# Altium footprint library Terminal_Blocks_Pluggable PCB_5.08mm.PcbLib: 299 footprints (part 4 of 19)
Each footprint in its own frame and in the unit in brackets; x right, y up, seen from the top. Pads: shape width x height; smd on the part's side, far side on the other; paste and mask are expansions set on the pad; w line width, h text height; cw(c..) or ccw(c..) is an arc to the next point about the centre after c.
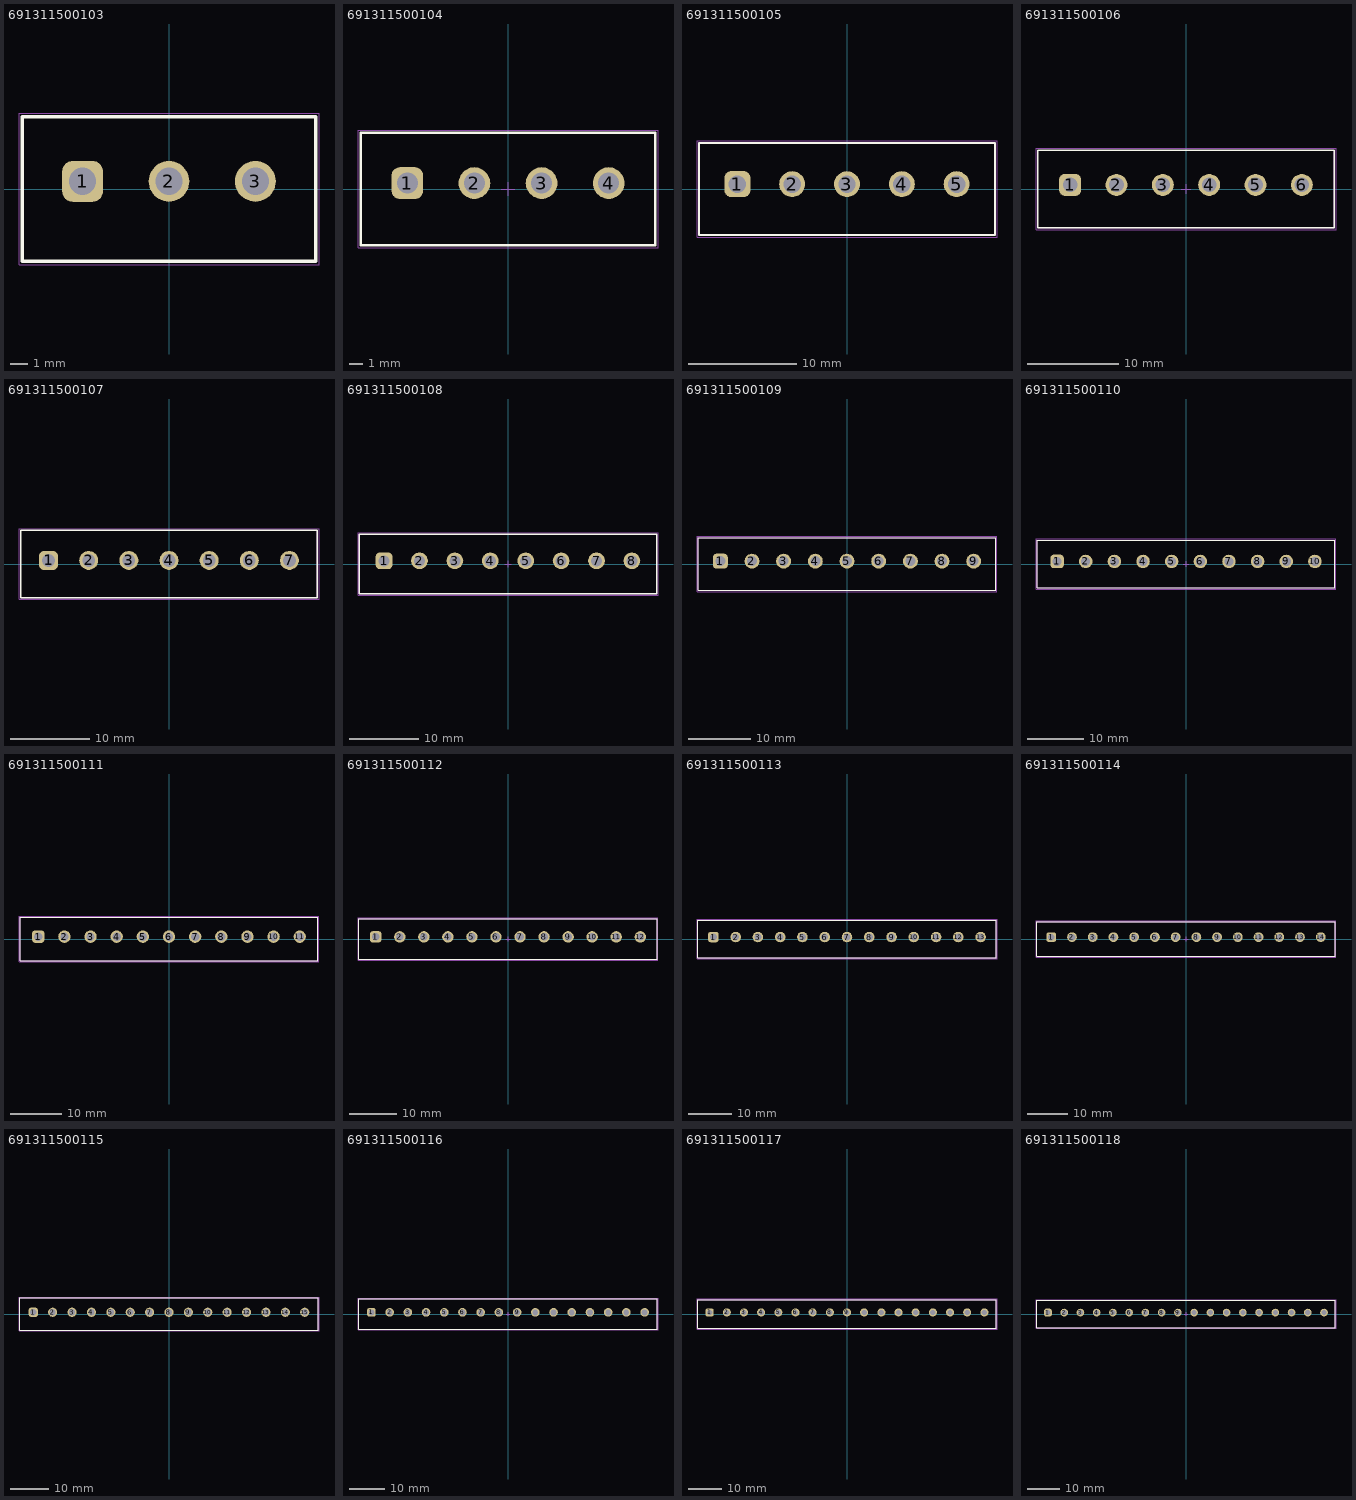
[diagram p3: the footprints below, top view; thin cyan lines are the x and y axes]

## 691311500103 [mm] "5,08mm - PCB Headers - Vertical - Closed ends -03p"
height 12
pads (3):
  rrect50% 2.4x2.4 hole 1.6: 1(-5.08,0.45)
  round 2.4 hole 1.6: 2(0,0.45) 3(5.08,0.45)
Top Overlay:
  lines w0.2: -8.62,-4.25 8.62,-4.25 8.62,4.25 -8.62,4.25 -8.62,-4.25
Top Designator:
  text ".Designator" at -7.498,-0.5 h1.5
Top Component Outline:
  lines w0.1: -8.62,-4.25 -8.62,4.25 8.62,4.25 8.62,-4.25 -8.62,-4.25
Top 3D Body:
  lines w0.1: -8.62,-4.25 8.62,-4.25 8.62,4.25 -8.62,4.25 -8.62,-4.25
Top Courtyard:
  lines w0.05: -8.82,-4.45 8.82,-4.45 8.82,4.45 -8.82,4.45 -8.82,-4.45
Top Component Center:
  lines w0.05: -0.5,0 0.5,0 ; 0,-0.5 0,0.5
3D body "691311500103.stp": height 12.05, standoff -3.95, extent -8.62,-4.25 8.62,4.25

## 691311500104 [mm] "5,08mm - PCB Headers - Vertical - Closed ends -04p"
height 12
pads (4):
  rrect50% 2.4x2.4 hole 1.6: 1(-7.62,0.45)
  round 2.4 hole 1.6: 2(-2.54,0.45) 3(2.54,0.45) 4(7.62,0.45)
Top Overlay:
  lines w0.2: -11.16,-4.25 -11.16,4.25 11.16,4.25 11.16,-4.25 -11.16,-4.25
Top Designator:
  text ".Designator" at -7.498,-0.5 h1.5
Top Component Outline:
  lines w0.1: -11.16,-4.25 11.16,-4.25 11.16,4.25 -11.16,4.25 -11.16,-4.25
Top 3D Body:
  lines w0.1: -11.16,-4.25 -11.16,4.25 11.16,4.25 11.16,-4.25 -11.16,-4.25
Top Courtyard:
  lines w0.05: -11.36,-4.45 -11.36,4.45 11.36,4.45 11.36,-4.45 -11.36,-4.45
Top Component Center:
  lines w0.05: -0.5,0 0.5,0 ; 0,-0.5 0,0.5
3D body "691311500104.stp": height 12.05, standoff -3.95, extent -11.16,-4.25 11.16,4.25

## 691311500105 [mm] "5,08mm - PCB Headers - Vertical - Closed ends -05p"
height 12
pads (5):
  rrect50% 2.4x2.4 hole 1.6: 1(-10.16,0.45)
  round 2.4 hole 1.6: 2(-5.08,0.45) 3(0,0.45) 4(5.08,0.45) 5(10.16,0.45)
Top Overlay:
  lines w0.2: -13.7,-4.25 -13.7,4.25 13.7,4.25 13.7,-4.25 -13.7,-4.25
Top Designator:
  text ".Designator" at -7.498,-0.5 h1.5
Top Component Outline:
  lines w0.1: -13.7,-4.25 13.7,-4.25 13.7,4.25 -13.7,4.25 -13.7,-4.25
Top 3D Body:
  lines w0.1: -13.7,-4.25 -13.7,4.25 13.7,4.25 13.7,-4.25 -13.7,-4.25
Top Courtyard:
  lines w0.05: -13.9,-4.45 -13.9,4.45 13.9,4.45 13.9,-4.45 -13.9,-4.45
Top Component Center:
  lines w0.05: -0.5,0 0.5,0 ; 0,-0.5 0,0.5
3D body "691311500105.stp": height 12.05, standoff -3.95, extent -13.7,-4.25 13.7,4.25

## 691311500106 [mm] "5,08mm - PCB Headers - Vertical - Closed ends -06p"
height 12
pads (6):
  rrect50% 2.4x2.4 hole 1.6: 1(-12.7,0.45)
  round 2.4 hole 1.6: 2(-7.62,0.45) 3(-2.54,0.45) 4(2.54,0.45) 5(7.62,0.45) 6(12.7,0.45)
Top Overlay:
  lines w0.2: -16.24,-4.25 16.24,-4.25 16.24,4.25 -16.24,4.25 -16.24,-4.25
Top Designator:
  text ".Designator" at -7.498,-0.5 h1.5
Top Component Outline:
  lines w0.1: -16.24,-4.25 -16.24,4.25 16.24,4.25 16.24,-4.25 -16.24,-4.25
Top 3D Body:
  lines w0.1: -16.24,-4.25 16.24,-4.25 16.24,4.25 -16.24,4.25 -16.24,-4.25
Top Courtyard:
  lines w0.05: -16.44,-4.45 16.44,-4.45 16.44,4.45 -16.44,4.45 -16.44,-4.45
Top Component Center:
  lines w0.05: -0.5,0 0.5,0 ; 0,-0.5 0,0.5
3D body "691311500106.stp": height 12.05, standoff -3.95, extent -16.24,-4.25 16.24,4.25

## 691311500107 [mm] "5,08mm - PCB Headers - Vertical - Closed ends -07p"
height 12
pads (7):
  rrect50% 2.4x2.4 hole 1.6: 1(-15.24,0.45)
  round 2.4 hole 1.6: 2(-10.16,0.45) 3(-5.08,0.45) 4(0,0.45) 5(5.08,0.45) 6(10.16,0.45) 7(15.24,0.45)
Top Overlay:
  lines w0.2: -18.78,-4.25 18.78,-4.25 18.78,4.25 -18.78,4.25 -18.78,-4.25
Top Designator:
  text ".Designator" at -7.498,-0.5 h1.5
Top Component Outline:
  lines w0.1: -18.78,-4.25 -18.78,4.25 18.78,4.25 18.78,-4.25 -18.78,-4.25
Top 3D Body:
  lines w0.1: -18.78,-4.25 18.78,-4.25 18.78,4.25 -18.78,4.25 -18.78,-4.25
Top Courtyard:
  lines w0.05: -18.98,-4.45 18.98,-4.45 18.98,4.45 -18.98,4.45 -18.98,-4.45
Top Component Center:
  lines w0.05: -0.5,0 0.5,0 ; 0,-0.5 0,0.5
3D body "691311500107.stp": height 12.05, standoff -3.95, extent -18.78,-4.25 18.78,4.25

## 691311500108 [mm] "5,08mm - PCB Headers - Vertical - Closed ends -08p"
height 12
pads (8):
  rrect50% 2.4x2.4 hole 1.6: 1(-17.78,0.45)
  round 2.4 hole 1.6: 2(-12.7,0.45) 3(-7.62,0.45) 4(-2.54,0.45) 5(2.54,0.45) 6(7.62,0.45) 7(12.7,0.45) 8(17.78,0.45)
Top Overlay:
  lines w0.2: -21.32,-4.25 21.32,-4.25 21.32,4.25 -21.32,4.25 -21.32,-4.25
Top Designator:
  text ".Designator" at -7.498,-0.5 h1.5
Top Component Outline:
  lines w0.1: -21.32,-4.25 -21.32,4.25 21.32,4.25 21.32,-4.25 -21.32,-4.25
Top 3D Body:
  lines w0.1: -21.32,-4.25 21.32,-4.25 21.32,4.25 -21.32,4.25 -21.32,-4.25
Top Courtyard:
  lines w0.05: -21.52,-4.45 21.52,-4.45 21.52,4.45 -21.52,4.45 -21.52,-4.45
Top Component Center:
  lines w0.05: -0.5,0 0.5,0 ; 0,-0.5 0,0.5
3D body "691311500108.stp": height 12.05, standoff -3.95, extent -21.32,-4.25 21.32,4.25

## 691311500109 [mm] "5,08mm - PCB Headers - Vertical - Closed ends -09p"
height 12
pads (9):
  rrect50% 2.4x2.4 hole 1.6: 1(-20.32,0.45)
  round 2.4 hole 1.6: 2(-15.24,0.45) 3(-10.16,0.45) 4(-5.08,0.45) 5(0,0.45) 6(5.08,0.45) 7(10.16,0.45) 8(15.24,0.45) 9(20.32,0.45)
Top Overlay:
  lines w0.2: -23.86,-4.25 23.86,-4.25 23.86,4.25 -23.86,4.25 -23.86,-4.25
Top Designator:
  text ".Designator" at -7.498,-0.5 h1.5
Top Component Outline:
  lines w0.1: -23.86,-4.25 -23.86,4.25 23.86,4.25 23.86,-4.25 -23.86,-4.25
Top 3D Body:
  lines w0.1: -23.86,-4.25 23.86,-4.25 23.86,4.25 -23.86,4.25 -23.86,-4.25
Top Courtyard:
  lines w0.05: -24.06,-4.45 24.06,-4.45 24.06,4.45 -24.06,4.45 -24.06,-4.45
Top Component Center:
  lines w0.05: -0.5,0 0.5,0 ; 0,-0.5 0,0.5
3D body "691311500109.stp": height 12.05, standoff -3.95, extent -23.86,-4.25 23.86,4.25

## 691311500110 [mm] "5,08mm - PCB Headers - Vertical - Closed ends -10p"
height 12
pads (10):
  rrect50% 2.4x2.4 hole 1.6: 1(-22.86,0.45)
  round 2.4 hole 1.6: 2(-17.78,0.45) 3(-12.7,0.45) 4(-7.62,0.45) 5(-2.54,0.45) 6(2.54,0.45) 7(7.62,0.45) 8(12.7,0.45) 9(17.78,0.45) 10(22.86,0.45)
Top Overlay:
  lines w0.2: -26.4,-4.25 26.4,-4.25 26.4,4.25 -26.4,4.25 -26.4,-4.25
Top Designator:
  text ".Designator" at -7.498,-0.5 h1.5
Top Component Outline:
  lines w0.1: -26.4,-4.25 -26.4,4.25 26.4,4.25 26.4,-4.25 -26.4,-4.25
Top 3D Body:
  lines w0.1: -26.4,-4.25 26.4,-4.25 26.4,4.25 -26.4,4.25 -26.4,-4.25
Top Courtyard:
  lines w0.05: -26.6,-4.45 26.6,-4.45 26.6,4.45 -26.6,4.45 -26.6,-4.45
Top Component Center:
  lines w0.05: -0.5,0 0.5,0 ; 0,-0.5 0,0.5
3D body "691311500110.stp": height 12.05, standoff -3.95, extent -26.4,-4.25 26.4,4.25

## 691311500111 [mm] "5,08mm - PCB Headers - Vertical - Closed ends -11p"
height 12
pads (11):
  rrect50% 2.4x2.4 hole 1.6: 1(-25.4,0.45)
  round 2.4 hole 1.6: 2(-20.32,0.45) 3(-15.24,0.45) 4(-10.16,0.45) 5(-5.08,0.45) 6(0,0.45) 7(5.08,0.45) 8(10.16,0.45) 9(15.24,0.45) 10(20.32,0.45) 11(25.4,0.45)
Top Overlay:
  lines w0.2: -28.94,-4.25 28.94,-4.25 28.94,4.25 -28.94,4.25 -28.94,-4.25
Top Designator:
  text ".Designator" at -7.498,-0.5 h1.5
Top Component Outline:
  lines w0.1: -28.94,-4.25 -28.94,4.25 28.94,4.25 28.94,-4.25 -28.94,-4.25
Top 3D Body:
  lines w0.1: -28.94,-4.25 28.94,-4.25 28.94,4.25 -28.94,4.25 -28.94,-4.25
Top Courtyard:
  lines w0.05: -29.14,-4.45 29.14,-4.45 29.14,4.45 -29.14,4.45 -29.14,-4.45
Top Component Center:
  lines w0.05: -0.5,0 0.5,0 ; 0,-0.5 0,0.5
3D body "691311500111.stp": height 12.05, standoff -3.95, extent -28.94,-4.25 28.94,4.25

## 691311500112 [mm] "5,08mm - PCB Headers - Vertical - Closed ends -12p"
height 12
pads (12):
  rrect50% 2.4x2.4 hole 1.6: 1(-27.94,0.45)
  round 2.4 hole 1.6: 2(-22.86,0.45) 3(-17.78,0.45) 4(-12.7,0.45) 5(-7.62,0.45) 6(-2.54,0.45) 7(2.54,0.45) 8(7.62,0.45) 9(12.7,0.45) 10(17.78,0.45) 11(22.86,0.45) 12(27.94,0.45)
Top Overlay:
  lines w0.2: -31.48,-4.25 -31.48,4.25 31.48,4.25 31.48,-4.25 -31.48,-4.25
Top Designator:
  text ".Designator" at -7.498,-0.5 h1.5
Top Component Outline:
  lines w0.1: -31.48,-4.25 31.48,-4.25 31.48,4.25 -31.48,4.25 -31.48,-4.25
Top 3D Body:
  lines w0.1: -31.48,-4.25 -31.48,4.25 31.48,4.25 31.48,-4.25 -31.48,-4.25
Top Courtyard:
  lines w0.05: -31.68,-4.45 -31.68,4.45 31.68,4.45 31.68,-4.45 -31.68,-4.45
Top Component Center:
  lines w0.05: -0.5,0 0.5,0 ; 0,-0.5 0,0.5
3D body "691311500112.stp": height 12.05, standoff -3.95, extent -31.48,-4.25 31.48,4.25

## 691311500113 [mm] "5,08mm - PCB Headers - Vertical - Closed ends -13p"
height 12
pads (13):
  rrect50% 2.4x2.4 hole 1.6: 1(-30.48,0.45)
  round 2.4 hole 1.6: 2(-25.4,0.45) 3(-20.32,0.45) 4(-15.24,0.45) 5(-10.16,0.45) 6(-5.08,0.45) 7(0,0.45) 8(5.08,0.45) 9(10.16,0.45) 10(15.24,0.45) 11(20.32,0.45) 12(25.4,0.45) 13(30.48,0.45)
Top Overlay:
  lines w0.2: -34.02,-4.25 34.02,-4.25 34.02,4.25 -34.02,4.25 -34.02,-4.25
Top Designator:
  text ".Designator" at -7.498,-0.5 h1.5
Top Component Outline:
  lines w0.1: -34.02,-4.25 -34.02,4.25 34.02,4.25 34.02,-4.25 -34.02,-4.25
Top 3D Body:
  lines w0.1: -34.02,-4.25 34.02,-4.25 34.02,4.25 -34.02,4.25 -34.02,-4.25
Top Courtyard:
  lines w0.05: -34.22,-4.45 34.22,-4.45 34.22,4.45 -34.22,4.45 -34.22,-4.45
Top Component Center:
  lines w0.05: -0.5,0 0.5,0 ; 0,-0.5 0,0.5
3D body "691311500113.stp": height 12.05, standoff -3.95, extent -34.02,-4.25 34.02,4.25

## 691311500114 [mm] "5,08mm - PCB Headers - Vertical - Closed ends -14p"
height 12
pads (14):
  rrect50% 2.4x2.4 hole 1.6: 1(-33.02,0.45)
  round 2.4 hole 1.6: 2(-27.94,0.45) 3(-22.86,0.45) 4(-17.78,0.45) 5(-12.7,0.45) 6(-7.62,0.45) 7(-2.54,0.45) 8(2.54,0.45) 9(7.62,0.45) 10(12.7,0.45) 11(17.78,0.45) 12(22.86,0.45) 13(27.94,0.45) 14(33.02,0.45)
Top Overlay:
  lines w0.2: -36.56,-4.25 -36.56,4.25 36.56,4.25 36.56,-4.25 -36.56,-4.25
Top Designator:
  text ".Designator" at -7.498,-0.5 h1.5
Top Component Outline:
  lines w0.1: -36.56,-4.25 36.56,-4.25 36.56,4.25 -36.56,4.25 -36.56,-4.25
Top 3D Body:
  lines w0.1: -36.56,-4.25 -36.56,4.25 36.56,4.25 36.56,-4.25 -36.56,-4.25
Top Courtyard:
  lines w0.05: -36.76,-4.45 -36.76,4.45 36.76,4.45 36.76,-4.45 -36.76,-4.45
Top Component Center:
  lines w0.05: -0.5,0 0.5,0 ; 0,-0.5 0,0.5
3D body "691311500114.stp": height 12.05, standoff -3.95, extent -36.56,-4.25 36.56,4.25

## 691311500115 [mm] "5,08mm - PCB Headers - Vertical - Closed ends -15p"
height 12
pads (15):
  rrect50% 2.4x2.4 hole 1.6: 1(-35.56,0.45)
  round 2.4 hole 1.6: 2(-30.48,0.45) 3(-25.4,0.45) 4(-20.32,0.45) 5(-15.24,0.45) 6(-10.16,0.45) 7(-5.08,0.45) 8(0,0.45) 9(5.08,0.45) 10(10.16,0.45) 11(15.24,0.45) 12(20.32,0.45) 13(25.4,0.45) 14(30.48,0.45) 15(35.56,0.45)
Top Overlay:
  lines w0.2: -39.1,-4.25 39.1,-4.25 39.1,4.25 -39.1,4.25 -39.1,-4.25
Top Designator:
  text ".Designator" at -7.498,-0.5 h1.5
Top Component Outline:
  lines w0.1: -39.1,-4.25 -39.1,4.25 39.1,4.25 39.1,-4.25 -39.1,-4.25
Top 3D Body:
  lines w0.1: -39.1,-4.25 39.1,-4.25 39.1,4.25 -39.1,4.25 -39.1,-4.25
Top Courtyard:
  lines w0.05: -39.3,-4.45 39.3,-4.45 39.3,4.45 -39.3,4.45 -39.3,-4.45
Top Component Center:
  lines w0.05: -0.5,0 0.5,0 ; 0,-0.5 0,0.5
3D body "691311500115.stp": height 12.05, standoff -3.95, extent -39.1,-4.25 39.1,4.25

## 691311500116 [mm] "5,08mm - PCB Headers - Vertical - Closed ends -16p"
height 12
pads (16):
  rrect50% 2.4x2.4 hole 1.6: 1(-38.1,0.45)
  round 2.4 hole 1.6: 2(-33.02,0.45) 3(-27.94,0.45) 4(-22.86,0.45) 5(-17.78,0.45) 6(-12.7,0.45) 7(-7.62,0.45) 8(-2.54,0.45) 9(2.54,0.45) 10(7.62,0.45) 11(12.7,0.45) 12(17.78,0.45) 13(22.86,0.45) 14(27.94,0.45) 15(33.02,0.45) 16(38.1,0.45)
Top Overlay:
  lines w0.2: -41.64,-4.25 41.64,-4.25 41.64,4.25 -41.64,4.25 -41.64,-4.25
Top Designator:
  text ".Designator" at -7.498,-0.5 h1.5
Top Component Outline:
  lines w0.1: -41.64,-4.25 -41.64,4.25 41.64,4.25 41.64,-4.25 -41.64,-4.25
Top 3D Body:
  lines w0.1: -41.64,-4.25 41.64,-4.25 41.64,4.25 -41.64,4.25 -41.64,-4.25
Top Courtyard:
  lines w0.05: -41.84,-4.45 41.84,-4.45 41.84,4.45 -41.84,4.45 -41.84,-4.45
Top Component Center:
  lines w0.05: -0.5,0 0.5,0 ; 0,-0.5 0,0.5
3D body "691311500116.stp": height 12.05, standoff -3.95, extent -41.64,-4.25 41.64,4.25

## 691311500117 [mm] "5,08mm - PCB Headers - Vertical - Closed ends -17p"
height 12
pads (17):
  rrect50% 2.4x2.4 hole 1.6: 1(-40.64,0.45)
  round 2.4 hole 1.6: 2(-35.56,0.45) 3(-30.48,0.45) 4(-25.4,0.45) 5(-20.32,0.45) 6(-15.24,0.45) 7(-10.16,0.45) 8(-5.08,0.45) 9(0,0.45) 10(5.08,0.45) 11(10.16,0.45) 12(15.24,0.45) 13(20.32,0.45) 14(25.4,0.45) 15(30.48,0.45) 16(35.56,0.45) 17(40.64,0.45)
Top Overlay:
  lines w0.2: -44.18,-4.25 -44.18,4.25 44.18,4.25 44.18,-4.25 -44.18,-4.25
Top Designator:
  text ".Designator" at -7.498,-0.5 h1.5
Top Component Outline:
  lines w0.1: -44.18,-4.25 44.18,-4.25 44.18,4.25 -44.18,4.25 -44.18,-4.25
Top 3D Body:
  lines w0.1: -44.18,-4.25 -44.18,4.25 44.18,4.25 44.18,-4.25 -44.18,-4.25
Top Courtyard:
  lines w0.05: -44.38,-4.45 -44.38,4.45 44.38,4.45 44.38,-4.45 -44.38,-4.45
Top Component Center:
  lines w0.05: -0.5,0 0.5,0 ; 0,-0.5 0,0.5
3D body "691311500117.stp": height 12.05, standoff -3.95, extent -44.18,-4.25 44.18,4.25

## 691311500118 [mm] "5,08mm - PCB Headers - Vertical - Closed ends -18p"
height 12
pads (18):
  rrect50% 2.4x2.4 hole 1.6: 1(-43.18,0.45)
  round 2.4 hole 1.6: 2(-38.1,0.45) 3(-33.02,0.45) 4(-27.94,0.45) 5(-22.86,0.45) 6(-17.78,0.45) 7(-12.7,0.45) 8(-7.62,0.45) 9(-2.54,0.45) 10(2.54,0.45) 11(7.62,0.45) 12(12.7,0.45) 13(17.78,0.45) 14(22.86,0.45) 15(27.94,0.45) 16(33.02,0.45) 17(38.1,0.45) 18(43.18,0.45)
Top Overlay:
  lines w0.2: -46.72,-4.25 -46.72,4.25 46.72,4.25 46.72,-4.25 -46.72,-4.25
Top Designator:
  text ".Designator" at -7.498,-0.5 h1.5
Top Component Outline:
  lines w0.1: -46.72,-4.25 46.72,-4.25 46.72,4.25 -46.72,4.25 -46.72,-4.25
Top 3D Body:
  lines w0.1: -46.72,-4.25 -46.72,4.25 46.72,4.25 46.72,-4.25 -46.72,-4.25
Top Courtyard:
  lines w0.05: -46.92,-4.45 -46.92,4.45 46.92,4.45 46.92,-4.45 -46.92,-4.45
Top Component Center:
  lines w0.05: -0.5,0 0.5,0 ; 0,-0.5 0,0.5
3D body "691311500118.stp": height 12.05, standoff -3.95, extent -46.72,-4.25 46.72,4.25